# Altium footprint library PCB_PTUController.PcbLib: 106 footprints (part 2 of 7)
Each footprint in its own frame and in the unit in brackets; x right, y up, seen from the top. Pads: shape width x height; smd on the part's side, far side on the other; paste and mask are expansions set on the pad; w line width, h text height; cw(c..) or ccw(c..) is an arc to the next point about the centre after c.
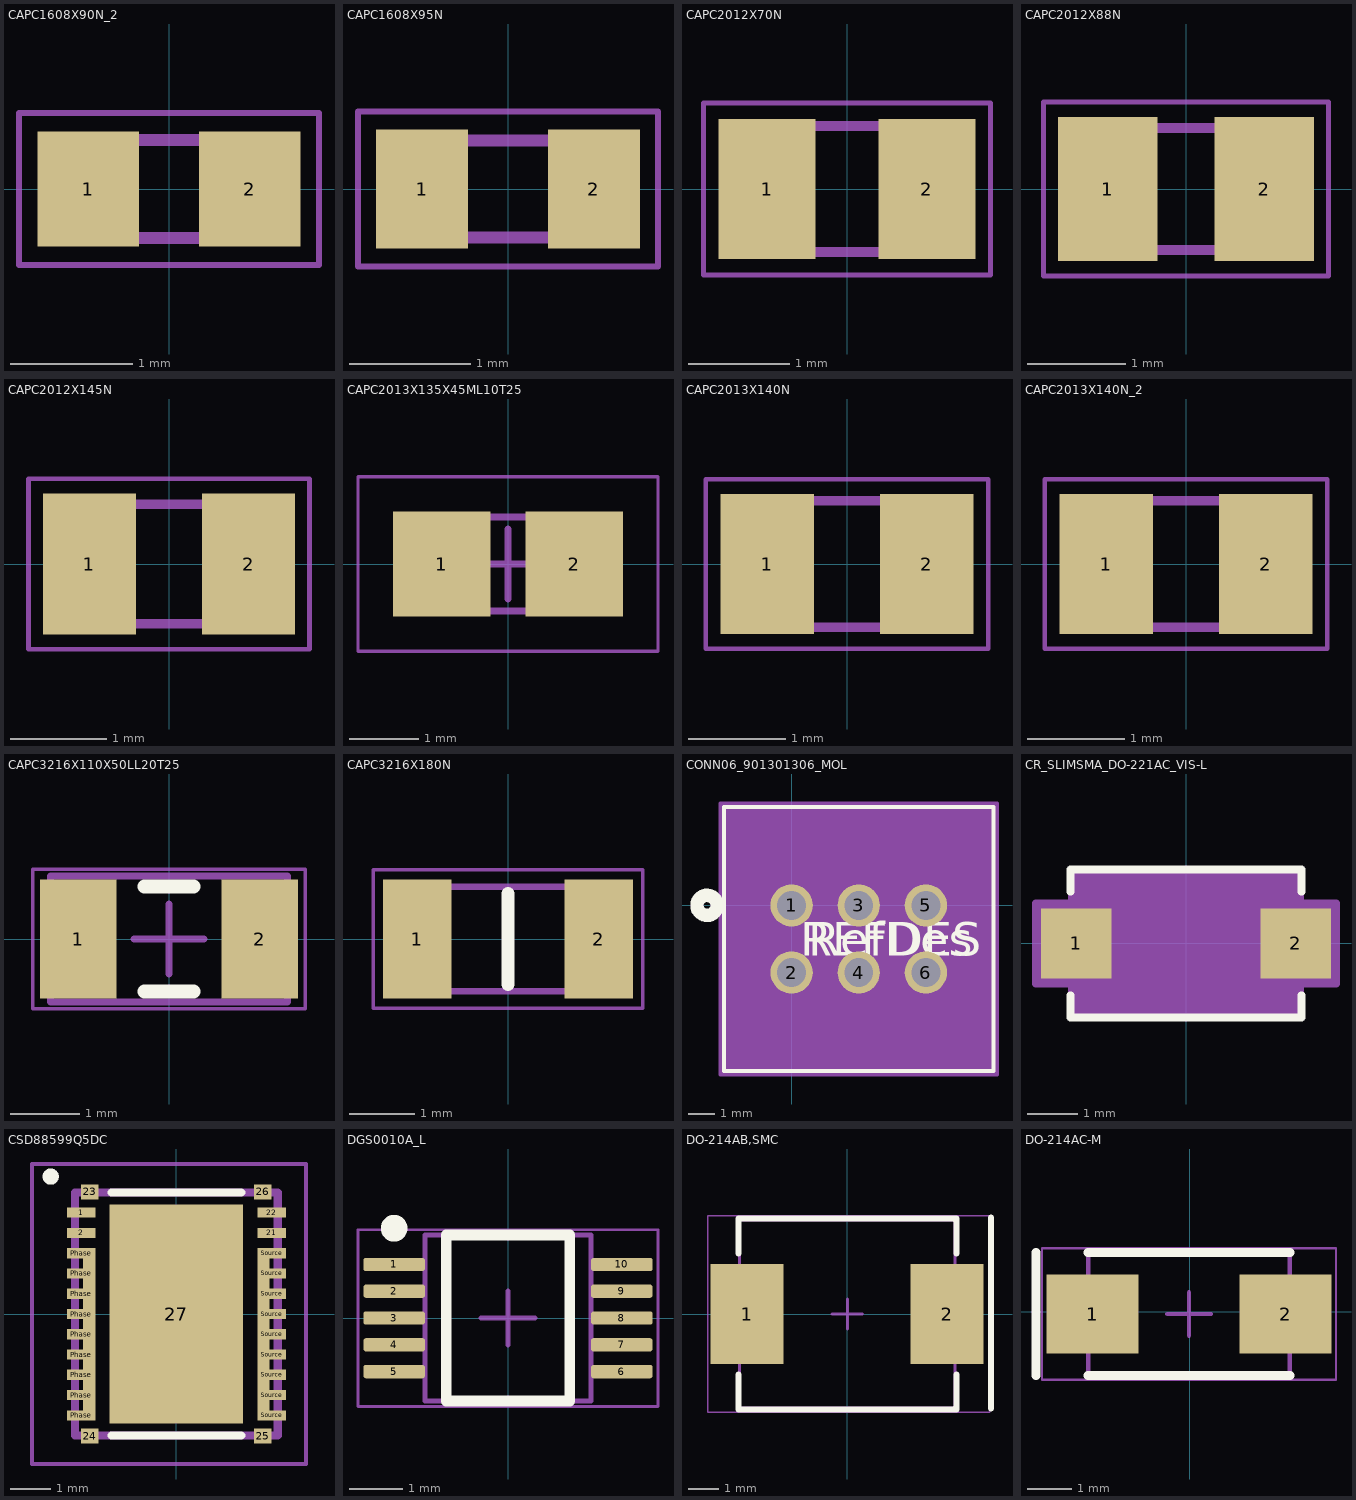
[diagram p1: the footprints below, top view; thin cyan lines are the x and y axes]

## CAPC1608X90N_2 [mm]
pads (2):
  rect 0.83x0.94 smd: 1(-0.66,0) 2(0.66,0)
Top 3D Body:
  lines w0.1: -0.8,-0.4 -0.8,0.4 0.8,0.4 0.8,-0.4 -0.8,-0.4
Top Courtyard:
  lines w0.05: -1.225,-0.62 -1.225,0.62 1.225,0.62 1.225,-0.62 -1.225,-0.62
3D body "CC0603KRX7R7BB104.stp": height 0.8, standoff 0, extent -0.803,-0.399 0.797,0.401

## CAPC1608X95N [mm]
pads (2):
  rect 0.76x0.98 smd: 1(-0.71,0) 2(0.71,0)
Top 3D Body:
  lines w0.1: -0.8,-0.4 -0.8,0.4 0.8,0.4 0.8,-0.4 -0.8,-0.4
Top Courtyard:
  lines w0.05: -1.24,-0.64 -1.24,0.64 1.24,0.64 1.24,-0.64 -1.24,-0.64
3D body "CL10B475KQ8NQNC.stp": height 0.95, standoff 0, extent -0.8,-0.4 0.8,0.4

## CAPC2012X70N [mm]
pads (2):
  rect 0.96x1.39 smd: 1(-0.79,0) 2(0.79,0)
Top 3D Body:
  lines w0.1: -1,-0.625 1,-0.625 1,0.625 -1,0.625 -1,-0.625
Top Courtyard:
  lines w0.05: -1.42,-0.85 1.42,-0.85 1.42,0.85 -1.42,0.85 -1.42,-0.85
3D body "CC0805BRNPO9BNR47.stp": height 0.7, standoff 0, extent -1,-0.625 1,0.625

## CAPC2012X88N [mm]
pads (2):
  rect 1.02x1.47 smd: 1(-0.8,0) 2(0.8,0)
Top 3D Body:
  lines w0.1: -1,-0.625 1,-0.625 1,0.625 -1,0.625 -1,-0.625
Top Courtyard:
  lines w0.05: -1.46,-0.89 1.46,-0.89 1.46,0.89 -1.46,0.89 -1.46,-0.89
3D body "C0805C102J5GAC-TU.stp": height 0.88, standoff 0, extent -1.1,-0.72 1.1,0.73

## CAPC2012X145N [mm]
pads (2):
  rect 0.97x1.47 smd: 1(-0.83,0) 2(0.83,0)
Top Courtyard:
  lines w0.1: -1,-0.625 1,-0.625 1,0.625 -1,0.625 -1,-0.625
Bottom Assembly:
  lines w0.05: -1.465,-0.89 1.465,-0.89 1.465,0.89 -1.465,0.89 -1.465,-0.89

## CAPC2013X135X45ML10T25 [mm] "Chip Capacitor, 2-Leads, Body 2.00x1.25mm, IPC Low Density"
height 1.35
pads (2):
  rect 1.4x1.5 smd: 1(-0.95,0) 2(0.95,0)
Top 3D Body:
  lines w0.1: -1.05,-0.675 -1.05,0.675 1.05,0.675 1.05,-0.675 -1.05,-0.675
Top Courtyard:
  lines w0.05: -2.15,-1.25 -2.15,1.25 2.15,1.25 2.15,-1.25 -2.15,-1.25
  lines w0.1: -0.5,0 0.5,0 ; 0,-0.5 0,0.5
3D body: height 1.35, standoff 0, extent -0.6,-0.675 0.6,0.675
3D body: height 1.35, standoff 0, extent -1.05,-0.675 -0.6,0.675
3D body: height 1.35, standoff 0, extent 0.6,-0.675 1.05,0.675

## CAPC2013X140N [mm]
pads (2):
  rect 0.96x1.44 smd: 1(-0.82,0) 2(0.82,0)
Top 3D Body:
  lines w0.1: -1.025,-0.65 -1.025,0.65 1.025,0.65 1.025,-0.65 -1.025,-0.65
Top Courtyard:
  lines w0.05: -1.45,-0.87 -1.45,0.87 1.45,0.87 1.45,-0.87 -1.45,-0.87
3D body "LMK212AB7106MG-T.stp": height 1.4, standoff 0, extent -1.025,-0.65 1.025,0.65

## CAPC2013X140N_2 [mm]
pads (2):
  rect 0.96x1.44 smd: 1(-0.82,0) 2(0.82,0)
Top 3D Body:
  lines w0.1: -1.025,-0.65 -1.025,0.65 1.025,0.65 1.025,-0.65 -1.025,-0.65
Top Courtyard:
  lines w0.05: -1.45,-0.87 -1.45,0.87 1.45,0.87 1.45,-0.87 -1.45,-0.87
3D body "LMK212AB7106MG-T.stp": height 1.4, standoff 0, extent -1.025,-0.65 1.025,0.65

## CAPC3216X110X50LL20T25 [mm] "Chip Capacitor, 2-Leads, Body 3.20x1.60mm, IPC High Density"
height 1.1
pads (2):
  rect 1.1x1.7 smd: 1(-1.3,0) 2(1.3,0)
Top Overlay:
  lines w0.2: -0.35,-0.75 0.35,-0.75 ; -0.35,0.75 0.35,0.75
Top 3D Body:
  lines w0.1: -1.7,-0.9 1.7,-0.9 1.7,0.9 -1.7,0.9 -1.7,-0.9
Top Courtyard:
  lines w0.05: -1.95,-1 1.95,-1 1.95,1 -1.95,1 -1.95,-1
  lines w0.1: -0.5,0 0.5,0 ; 0,-0.5 0,0.5
3D body: height 1.1, standoff 0, extent 1.2,-0.9 1.7,0.9
3D body: height 1.1, standoff 0, extent -1.7,-0.9 -1.2,0.9
3D body: height 1.1, standoff 0, extent -1.2,-0.9 1.2,0.9

## CAPC3216X180N [mm]
pads (2):
  rect 1.05x1.82 smd: 1(-1.39,0) 2(1.39,0)
Top Overlay:
  lines w0.2: 0,-0.7 0,0.7
Top Courtyard:
  lines w0.1: -1.6,-0.8 -1.6,0.8 1.6,0.8 1.6,-0.8 -1.6,-0.8
Bottom Assembly:
  lines w0.05: -2.065,-1.06 -2.065,1.06 2.065,1.06 2.065,-1.06 -2.065,-1.06

## CONN06_901301306_MOL [mil]
pads (6):
  round 63 / inner round 60 / far side round 63 hole 43 paste-99999 mask+0: 1(0,0) 2(0,-100) 3(100,0) 4(100,-100) 5(200,0) 6(200,-100)
Top Overlay:
  circle w20: c-126,0 r15
  lines w6: -101,-247.07 301,-247.07 301,146.93 -101,146.93 -101,-247.07
  text "RefDes" at 25,-75 h50
  text "REFDES" at 12.5,-75 h50
Bottom Overlay:
  circle w20: c-126,0 r15
Top 3D Body:
  circle w20: c0,75 r15
  lines w1: -96,-242.07 296,-242.07 296,141.93 -96,141.93 -96,-242.07
  text "RefDes2" at 12.5,-75 h50
Top Courtyard:
  region: 306,151.93 -106,151.93 -106,-252.07 306,-252.07
  lines w6: -106,-252.07 -106,151.93 306,151.93 306,-252.07 -106,-252.07
3D body "901301306.stp": height 434.57, standoff -108.74, extent -96.06,-241.93 296.06,141.93

## CR_SLIMSMA_DO-221AC_VIS-L [mil]
pads (2):
  rect 55x55 smd paste+0 mask+0: 1(-86,0) 2(86,0)
Top Overlay:
  lines w6: -90.5,-40.6 -90.5,-58 90.5,-58 90.5,-40.6 ; -90.5,40.6 -90.5,58 90.5,58 90.5,40.6
Top 3D Body:
  circle w0: c-58.5,0 r3
  lines w0: -12,53 ccw(c0,53) 12,53
  lines w1: -85.5,-53 -85.5,53 85.5,53 85.5,-53 -85.5,-53
Top Courtyard:
  region: -89.5,-31.5 -117.5,-31.5 -117.5,31.5 -89.5,31.5 -89.5,57 89.5,57 89.5,31.5 117.5,31.5 117.5,-31.5 89.5,-31.5 89.5,-57 -89.5,-57
  lines w6: -117.5,-31.5 -89.5,-31.5 -89.5,-57 89.5,-57 89.5,-31.5 117.5,-31.5 117.5,31.5 89.5,31.5 89.5,57 -89.5,57 -89.5,31.5 -117.5,31.5 -117.5,-31.5
3D body "CR_SLIMSMA_DO-221AC_VIS.step": height 39.09, standoff 0, extent -105.51,-52.99 105.51,52.99

## CSD88599Q5DC [mm]
pads (43):
  rect 0.7x0.25 smd: 1(-2.35,2.5) 2(-2.35,2) 21(2.35,2) 22(2.35,2.5) Phase(-2.35,-2.5) Phase(-2.35,-2) Phase(-2.35,-1.5) Phase(-2.35,-1) Phase(-2.35,-0.5) Phase(-2.35,0) Phase(-2.35,0.5) Phase(-2.35,1) Phase(-2.35,1.5) Source(2.35,-2.5) Source(2.35,-2) Source(2.35,-1.5) Source(2.35,-1) Source(2.35,-0.5) Source(2.35,0) Source(2.35,0.5) Source(2.35,1) Source(2.35,1.5)
  rect 0.43x0.375 smd: 23(-2.135,3.013) 24(-2.135,-3.013) 25(2.135,-3.013) 26(2.135,3.013)
  rect 3.3x5.4 smd: 27(0,0)
  rect 0.3x0.25 smd: Phase(-2.15,-2.25) Phase(-2.15,-1.75) Phase(-2.15,-1.25) Phase(-2.15,-0.75) Phase(-2.15,-0.25) Phase(-2.15,0.25) Phase(-2.15,0.75) Phase(-2.15,1.25) Source(2.15,-2.25) Source(2.15,-1.75) Source(2.15,-1.25) Source(2.15,-0.75) Source(2.15,-0.25) Source(2.15,0.25) Source(2.15,0.75) Source(2.15,1.25)
Top Overlay:
  lines w0.2: -1.6,-3 1.6,-3 ; -1.6,3 1.6,3 ; -3.2,3.389 ccw(c-3.1,3.389) -3,3.389 ccw(c-3.1,3.389) -3.2,3.389
Top 3D Body:
  lines w0.2: -2.5,-3 -2.5,3 2.5,3 2.5,-3 -2.5,-3
Top Courtyard:
  lines w0.1: -3.563,-3.7 -3.563,3.7 3.2,3.7 3.2,-3.7 -3.563,-3.7
3D body "CSD88599Q5DC.stp": height 1.05, standoff 0, extent -2.5,-3 2.5,3

## DGS0010A_L [mm] "SOP, 10-Leads, Body 3.1x3.1mm, Pitch 0.5mm, IPC High Density"
height 1.1
pads (10):
  rrect40% 1.15x0.25 smd: 1(-2.125,1) 2(-2.125,0.5) 3(-2.125,0) 4(-2.125,-0.5) 5(-2.125,-1) 6(2.125,-1) 7(2.125,-0.5) 8(2.125,0) 9(2.125,0.5) 10(2.125,1)
Top Overlay:
  circle w0.25: c-2.125,1.675 r0.125
  lines w0.2: -1.15,-1.55 1.15,-1.55 1.15,1.55 -1.15,1.55 -1.15,-1.55
Mechanical 1:
  text ".Designator" at 0.582,0.842 h0.7
Top 3D Body:
  lines w0.1: -1.55,-1.55 1.55,-1.55 1.55,1.55 -1.55,1.55 -1.55,-1.55
Top Courtyard:
  lines w0.05: -2.8,-1.65 2.8,-1.65 2.8,1.65 -2.8,1.65 -2.8,-1.65
  lines w0.1: -0.5,0 0.5,0 ; 0,-0.5 0,0.5
3D body "DGS0010AakaMUB10A.stp": height 0.94, standoff -0.02, extent -2.451,-1.499 2.451,1.499

## DO-214AB,SMC [mm] "DO-214AB"
height 2.62
pads (2):
  rect 2.4x3.3 smd: 1(-3.3,0) 2(3.3,0)
Top Overlay:
  lines w0.2: -3.587,-1.993 -3.587,-3.143 3.613,-3.143 3.613,-1.993 ; -3.587,2.007 -3.587,3.157 3.613,3.157 3.613,2.007 ; 4.747,-3.117 4.747,3.183
Top 3D Body:
  lines w0.1: -3.542,-3.103 -3.542,3.117 3.568,3.117 3.568,-3.103 -3.542,-3.103
Top Courtyard:
  lines w0.05: -4.595,-3.243 -4.595,3.257 4.704,3.257 4.704,-3.243 -4.595,-3.243
  lines w0.1: -0.487,0.007 0.513,0.007 ; 0.013,-0.493 0.013,0.507
3D body "DIOM6959X26L.step": height 2.62, standoff 0, extent -3.762,-3.103 3.788,3.117

## DO-214AC-M [mm] "DO-214AC-Medium density"
height 2.5
pads (2):
  rect 2.1x1.8 smd: 1(-2.212,-0.048) 2(2.188,-0.048)
Top Overlay:
  lines w0.2: -3.5,-1.448 -3.5,1.352 ; -2.312,-1.448 2.288,-1.448 ; -2.312,1.352 2.288,1.352
Top 3D Body:
  lines w0.1: -2.312,-1.443 -2.312,1.347 2.288,1.347 2.288,-1.443 -2.312,-1.443
Top Courtyard:
  lines w0.05: -3.362,-1.548 -3.362,1.452 3.338,1.452 3.338,-1.548 -3.362,-1.548
  lines w0.1: -0.512,-0.048 0.488,-0.048 ; -0.012,-0.548 -0.012,0.452
3D body "INDM4326X23L.step": height 2.29, standoff 0, extent -2.532,-1.443 2.508,1.347